# Altium footprint library 61301221821.PcbLib: 1 footprints
Each footprint in its own frame and in the unit in brackets; x right, y up, seen from the top. Pads: shape width x height; smd on the part's side, far side on the other; paste and mask are expansions set on the pad; w line width, h text height; cw(c..) or ccw(c..) is an arc to the next point about the centre after c.
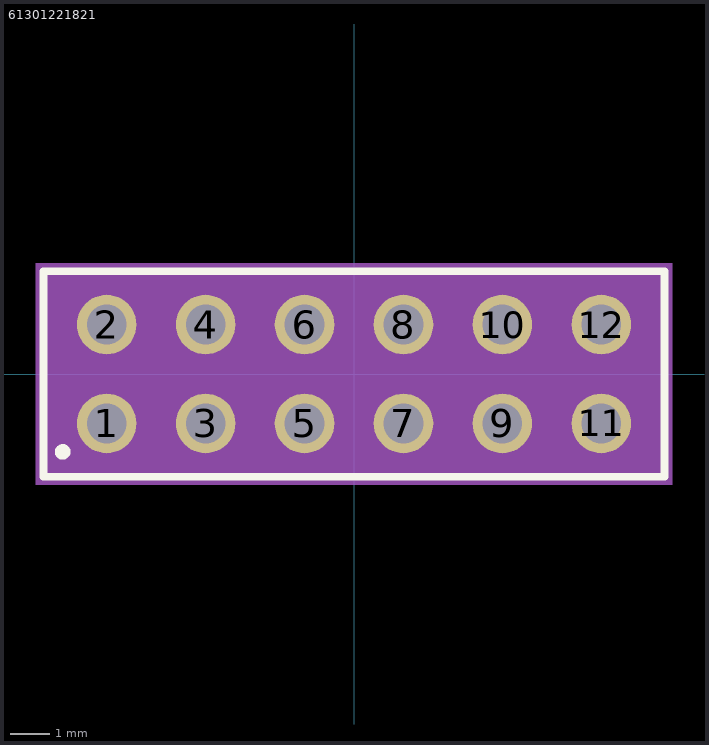
[diagram p0: the footprint, top view; thin cyan lines are the x and y axes]

## 61301221821 [mm]
pads (12):
  round 1.53 hole 1.02 mask+0.102: 1(-6.35,-1.27) 2(-6.35,1.27) 3(-3.81,-1.27) 4(-3.81,1.27) 5(-1.27,-1.27) 6(-1.27,1.27) 7(1.27,-1.27) 8(1.27,1.27) 9(3.81,-1.27) 10(3.81,1.27) 11(6.35,-1.27) 12(6.35,1.27)
Top Overlay:
  circle w0.2: c-7.48,-2 r0.1
  lines w0.2: -7.97,-2.64 7.97,-2.64 7.97,2.64 -7.97,2.64 -7.97,-2.64
Assembly Top:
  lines w0.1: -7.87,-2.54 -7.87,2.54 7.87,2.54 7.87,-2.54 -7.87,-2.54
Courtyard Top:
  region: 8.17,-2.84 -8.17,-2.84 -8.17,2.84 8.17,2.84